# Altium footprint library uw-madison-parts.PcbLib: 40 footprints (part 1 of 3)
Each footprint in its own frame and in the unit in brackets; x right, y up, seen from the top. Pads: shape width x height; smd on the part's side, far side on the other; paste and mask are expansions set on the pad; w line width, h text height; cw(c..) or ccw(c..) is an arc to the next point about the centre after c.
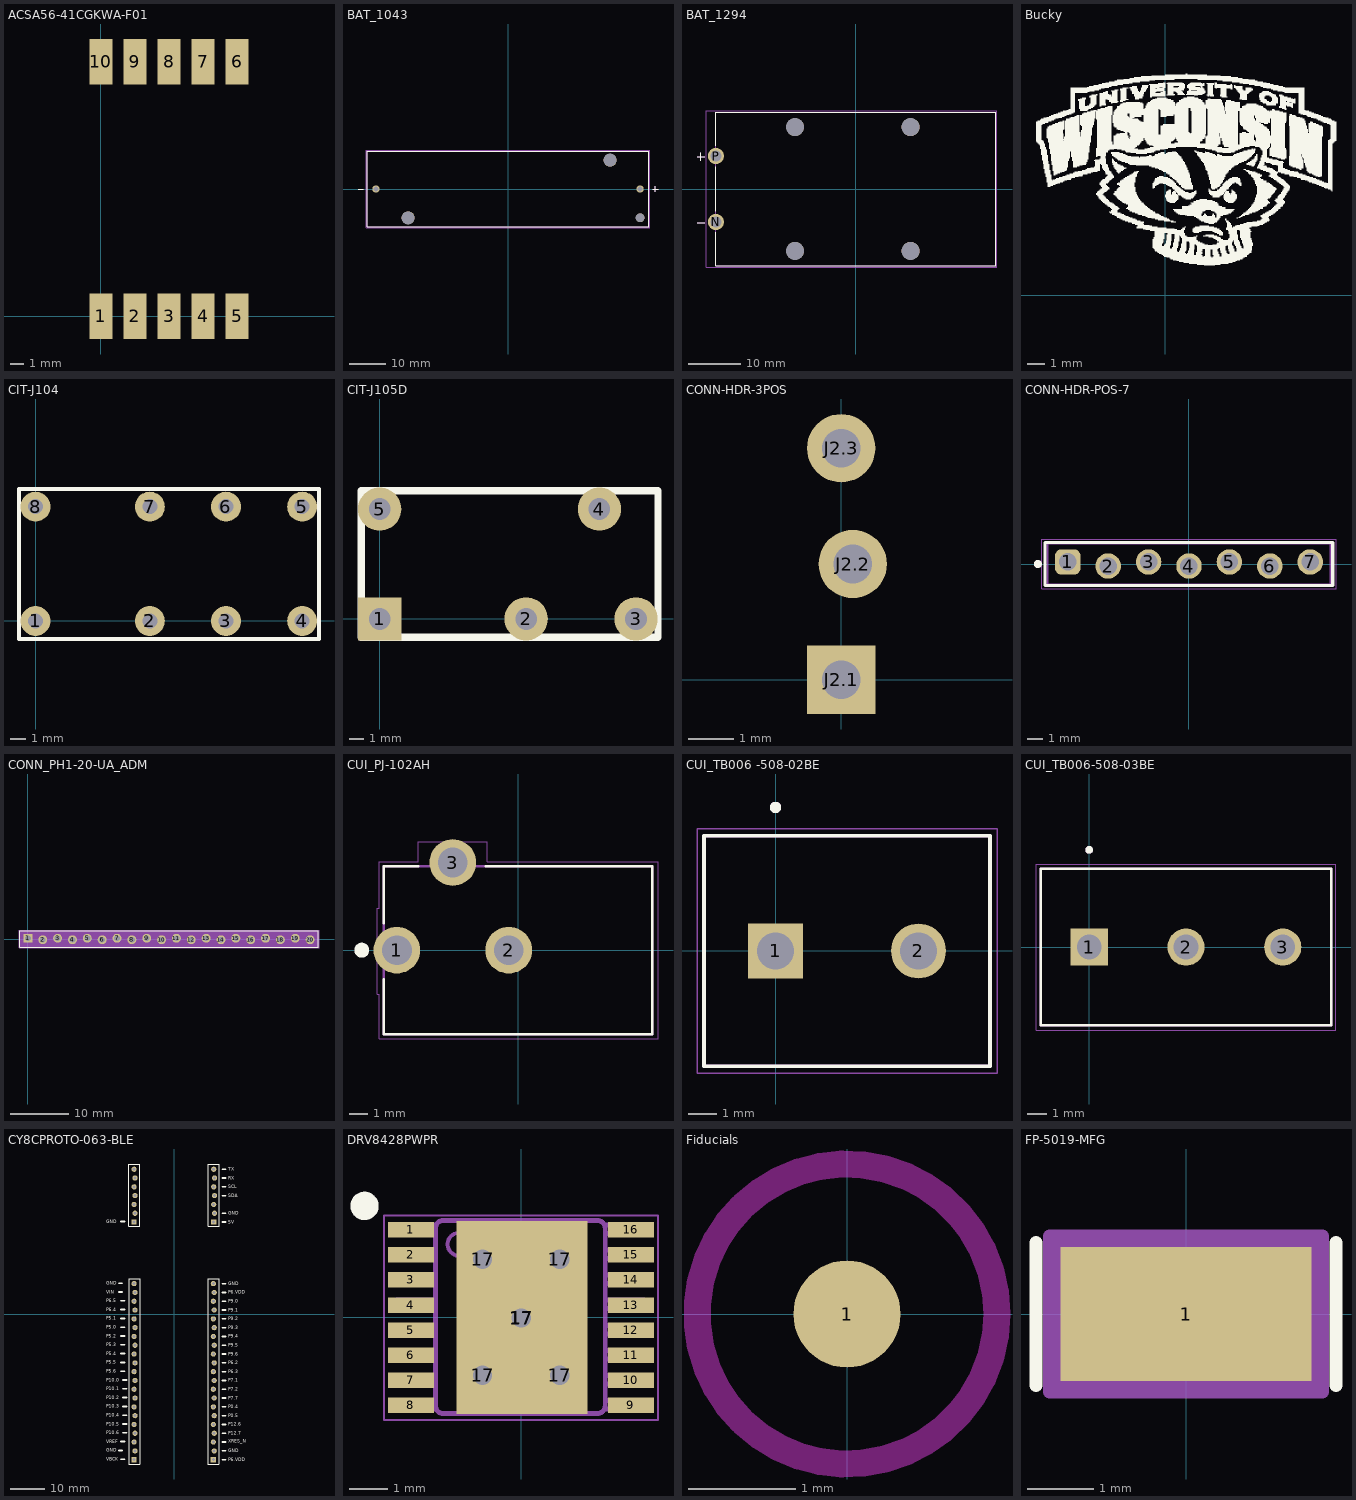
[diagram p0: the footprints below, top view; thin cyan lines are the x and y axes]

## ACSA56-41CGKWA-F01 [mm]
pads (10):
  rect 1.7x3.4 smd: 1(0,0) 2(2.54,0) 3(5.08,0) 4(7.62,0) 5(10.16,0) 6(10.16,19) 7(7.62,19) 8(5.08,19) 9(2.54,19) 10(0,19)
3D body "ACSA56-41CGKWA-F01.step": height 3.8, standoff 0, extent -1.12,0.025 11.28,19.025

## BAT_1043 [mm]
height 14.86
pads (5):
  round 1.98 hole 1.32: N(-36.11,0) P(36.11,0)
  round 3.55 hole 3.55 unplated: ""(-27.29,-7.87) ""(27.91,7.87)
  round 2.39 hole 2.39 unplated: ""(36.11,-7.87)
Top Overlay:
  lines w0.127: -41,0 -39.5,0 ; 39.5,0 41,0 ; 40.25,-0.75 40.25,0.75 ; -38.525,-10.325 38.525,-10.325 38.525,10.325 -38.525,10.325 -38.525,-10.325
Mechanical 13:
  lines w0.127: -41,0 -39.5,0 ; 39.5,0 41,0 ; 40.25,-0.75 40.25,0.75 ; -38.525,-10.325 38.525,-10.325 38.525,10.325 -38.525,10.325 -38.525,-10.325
Mechanical 15:
  lines w0.05: -38.775,-10.575 38.775,-10.575 38.775,10.575 -38.775,10.575 -38.775,-10.575
3D body "step_temp.STEP": height 14.86, standoff -3.56, extent -38.532,-10.325 38.532,10.325

## BAT_1294 [mm]
height 20.32
pads (6):
  round 3.126 hole 2.11: N(-26.925,-6.35) P(-26.925,6.35)
  round 3.45 hole 3.45 unplated: ""(-11.685,-11.915) ""(-11.685,11.915) ""(10.545,-11.915) ""(10.545,11.915)
Top Overlay:
  lines w0.127: -30.56,-6.52 -29.06,-6.52 ; -30.56,6.23 -29.06,6.23 ; -29.81,5.48 -29.81,6.98 ; -26.925,-8.35 -26.925,-14.785 26.925,-14.785 26.925,14.785 -26.925,14.785 -26.925,8.35 ; -26.925,-4.3 -26.925,4.3
Mechanical 13:
  lines w0.127: -30.56,-6.52 -29.06,-6.52 ; -30.56,6.23 -29.06,6.23 ; -29.81,5.48 -29.81,6.98 ; -26.925,-14.785 26.925,-14.785 26.925,14.785 -26.925,14.785 -26.925,-14.785
Mechanical 15:
  lines w0.05: -28.82,-15.035 -28.82,15.035 27.175,15.035 27.175,-15.035 -28.82,-15.035
3D body "step_temp.STEP": height 20.32, standoff -7.62, extent -27.229,-14.783 26.924,14.783

## Bucky [mm]
Top Overlay:
  drawing of 2083 lines, arcs and shapes, not listed

## CIT-J104 [mm]
pads (8):
  round 2 hole 1: 1(0,0) 2(7.62,0) 3(12.7,0) 4(17.78,0) 5(17.78,7.62) 6(12.7,7.62) 7(7.62,7.62) 8(0,7.62)
Top Overlay:
  lines w0.25: -1.1,-1.2 -1.1,8.8 18.9,8.8 18.9,-1.2 -1.1,-1.2

## CIT-J105D [mm]
pads (5):
  rect 3x3 hole 1.5: 1(0,0)
  round 3 hole 1.5: 2(10.16,0) 3(17.78,0) 4(15.24,7.62) 5(0,7.62)
Top Overlay:
  lines w0.5: -1.27,-1.27 -1.27,8.89
  lines w0.508: -1.27,-1.27 19.304,-1.27 19.304,8.89 -1.27,8.89

## CONN-HDR-3POS [mm] "CONN HEADER VERT 3POS 2.54MM"
pads (3):
  rect 1.5x1.5 hole 0.85: J2.1(0,0)
  round 1.5 hole 0.85: J2.2(0.254,2.54) J2.3(0,5.08)

## CONN-HDR-POS-7 [mm] "Pin Header, pitch 2.54 mm, THT, Vertical, single row, 7p"
height 8.54
pads (7):
  rrect50% 1.6x1.6 hole 1.1: 1(-7.62,0.127)
  round 1.6 hole 1.1: 2(-5.08,-0.127) 3(-2.54,0.127) 4(0,-0.127) 5(2.54,0.127) 6(5.08,-0.127) 7(7.62,0.127)
Top Overlay:
  circle w0.25: c-9.49,0 r0.125
  lines w0.2: -9.04,-1.345 9.04,-1.345 9.04,1.345 -9.04,1.345 -9.04,-1.345
Top Courtyard:
  lines w0.05: -9.24,-1.545 -9.24,1.545 9.24,1.545 9.24,-1.545 -9.24,-1.545
Top Designator:
Top Component Outline:
  lines w0.1: -8.89,-1.27 -8.89,1.27 8.89,1.27 8.89,-1.27 -8.89,-1.27
Top Component Center:
  lines w0.05: -0.5,0 0.5,0 ; 0,-0.5 0,0.5
3D body "61300711121.stp": height 8.57, standoff -2.97, extent -8.89,-1.27 8.89,1.27

## CONN_PH1-20-UA_ADM [mil]
pads (20):
  rect 60x60 hole 40 paste-99999 mask+0: 1(0,5)
  round 60 hole 40 paste-99999 mask+0: 2(100,-5) 3(200,5) 4(300,-5) 5(400,5) 6(500,-5) 7(600,5) 8(700,-5) 9(800,5) 10(900,-5) 11(1000,5) 12(1100,-5) 13(1200,5) 14(1300,-5) 15(1400,5) 16(1500,-5) 17(1600,5) 18(1700,-5) 19(1800,5) 20(1900,-5)
Top Overlay:
  lines w6: -55,-54 1955,-54 1955,54 -55,54 -55,-54
Mechanical 13:
  lines w1: -50,-49 1950,-49 1950,49 -50,49 -50,-49
Mechanical 15:
  region: 1960,59 -60,59 -60,-59 1960,-59
  lines w6: -60,-59 -60,59 1960,59 1960,-59 -60,-59

## CUI_PJ-102AH [mm]
pads (3):
  round 2.5 hole 1.6: 1(-6.5,0) 2(-0.5,0) 3(-3.5,4.7)
Top Overlay:
  circle w0.4: c-8.382,0 r0.2
  lines w0.127: -7.2,-1.55 -7.2,-4.5 7.2,-4.5 7.2,4.5 -1.75,4.5 ; -7.2,1.45 -7.2,4.5 -5.35,4.5
Mechanical 13:
  lines w0.127: -7.2,-4.5 7.2,-4.5 7.2,4.5 -7.2,4.5 -7.2,-4.5
Mechanical 15:
  lines w0.05: -7.55,-2.35 -7.55,2.25 -7.45,2.25 -7.45,4.75 -5.35,4.75 -5.35,5.8 -1.65,5.8 -1.65,4.75 7.5,4.75 7.5,-4.75 -7.45,-4.75 -7.45,-2.35 -7.55,-2.35

## CUI_TB006 -508-02BE [mm]
pads (2):
  rect 1.95x1.95 / inner round 1.95 / far side rect 1.95x1.95 hole 1.3: 1(0,0)
  round 1.95 hole 1.3: 2(5.08,0)
Top Overlay:
  circle w0.2: c0,5.1 r0.1
  lines w0.127: -2.54,-4.1 7.62,-4.1 7.62,4.1 -2.54,4.1 -2.54,-4.1
Mechanical 13:
  circle w0.2: c0,5.1 r0.1
  lines w0.127: -2.54,-4.1 7.62,-4.1 7.62,4.1 -2.54,4.1 -2.54,-4.1
Mechanical 15:
  lines w0.05: -2.79,-4.35 -2.79,4.35 7.87,4.35 7.87,-4.35 -2.79,-4.35

## CUI_TB006-508-03BE [mm]
pads (3):
  rect 1.95x1.95 / inner round 1.95 / far side rect 1.95x1.95 hole 1.3: 1(0,0)
  round 1.95 hole 1.3: 2(5.08,0) 3(10.16,0)
Top Overlay:
  circle w0.2: c0,5.1 r0.1
  lines w0.127: -2.54,-4.1 12.7,-4.1 12.7,4.1 -2.54,4.1 -2.54,-4.1
Mechanical 13:
  circle w0.2: c0,5.1 r0.1
  lines w0.127: -2.54,-4.1 12.7,-4.1 12.7,4.1 -2.54,4.1 -2.54,-4.1
Mechanical 15:
  lines w0.05: -2.79,-4.35 -2.79,4.35 12.95,4.35 12.95,-4.35 -2.79,-4.35
3D body "step_temp.STEP": height 10, standoff -3.8, extent -3.04,-4.1 12.7,4.1

## CY8CPROTO-063-BLE [mm]
pads (56):
  rect 1.5x1.5 hole 0.85: J1.1(11.253,-41.911) J2.1(-11.607,-41.911) J6.1(11.353,26.671) J7.1(-11.607,26.671)
  round 1.5 hole 0.85: J1.2(11.507,-39.371) J1.3(11.253,-36.831) J1.4(11.507,-34.291) J1.5(11.253,-31.751) J1.6(11.507,-29.211) J1.7(11.253,-26.671) J1.8(11.507,-24.131) J1.9(11.253,-21.591) J1.10(11.507,-19.051) J1.11(11.253,-16.511) J1.12(11.507,-13.971) J1.13(11.253,-11.431) J1.14(11.507,-8.891) J1.15(11.253,-6.351) J1.16(11.507,-3.811) J1.17(11.253,-1.271) J1.18(11.507,1.269) J1.19(11.253,3.809) J1.20(11.507,6.349) J1.21(11.253,8.889) J2.2(-11.353,-39.371) J2.3(-11.607,-36.831) J2.4(-11.353,-34.291) J2.5(-11.607,-31.751) J2.6(-11.353,-29.211) J2.7(-11.607,-26.671) J2.8(-11.353,-24.131) J2.9(-11.607,-21.591) J2.10(-11.353,-19.051) J2.11(-11.607,-16.511) J2.12(-11.353,-13.971) J2.13(-11.607,-11.431) J2.14(-11.353,-8.891) J2.15(-11.607,-6.351) J2.16(-11.353,-3.811) J2.17(-11.607,-1.271) J2.18(-11.353,1.269) J2.19(-11.607,3.809) J2.20(-11.353,6.349) J2.21(-11.607,8.889) J6.2(11.607,29.211) J6.3(11.353,31.751) J6.4(11.607,34.291) J6.5(11.353,36.831) J6.6(11.607,39.371) J6.7(11.353,41.911) J7.2(-11.353,29.211) J7.3(-11.607,31.751) J7.4(-11.353,34.291) J7.5(-11.607,36.831) J7.6(-11.353,39.371) J7.7(-11.607,41.911)
Top Overlay:
  lines w0.254: -13.23,-43.161 -13.23,10.339 -9.98,10.339 -9.98,-43.161 -13.23,-43.161 ; -13.23,25.421 -13.23,43.421 -9.98,43.421 -9.98,25.421 -13.23,25.421 ; 9.63,-43.161 12.88,-43.161 12.88,10.339 9.63,10.339 9.63,-43.161 ; 9.73,25.421 9.73,43.421 12.98,43.421 12.98,25.421 9.73,25.421
  lines w0.508: -16.052,-39.244 -15.052,-39.244 ; -16.052,6.476 -15.052,6.476 ; -16.052,9.016 -15.052,9.016 ; -15.417,-41.784 -14.417,-41.784 ; -15.417,-36.704 -14.417,-36.704 ; -15.417,-16.384 -14.417,-16.384 ; -15.417,-13.844 -14.417,-13.844 ; -15.417,-11.304 -14.417,-11.304 ; -15.417,-8.764 -14.417,-8.764 ; -15.417,-6.224 -14.417,-6.224 ; -15.417,-3.684 -14.417,-3.684 ; -15.417,-1.144 -14.417,-1.144 ; -15.417,1.396 -14.417,1.396 ; -15.417,3.936 -14.417,3.936 ; -15.417,26.796 -14.417,26.796 ; -14.782,-34.164 -13.782,-34.164 ; -14.782,-31.624 -13.782,-31.624 ; -14.782,-29.084 -13.782,-29.084 ; -14.782,-26.544 -13.782,-26.544 ; -14.782,-24.004 -13.782,-24.004 ; -14.782,-21.464 -13.782,-21.464 ; -14.782,-18.924 -13.782,-18.924 ; 13.793,-41.911 14.793,-41.911 ; 13.793,-39.371 14.793,-39.371 ; 13.793,-36.831 14.793,-36.831 ; 13.793,-34.291 14.793,-34.291 ; 13.793,-31.751 14.793,-31.751 ; 13.793,-29.211 14.793,-29.211 ; 13.793,-26.671 14.793,-26.671 ; 13.793,-24.131 14.793,-24.131 ; 13.793,-21.591 14.793,-21.591 ; 13.793,-19.051 14.793,-19.051 ; 13.793,-16.511 14.793,-16.511 ; 13.793,-13.971 14.793,-13.971 ; 13.793,-11.431 14.793,-11.431 ; 13.793,-8.891 14.793,-8.891 ; 13.793,-6.351 14.793,-6.351 ; 13.793,-3.811 14.793,-3.811 ; 13.793,-1.271 14.793,-1.271 ; 13.793,1.269 14.793,1.269 ; 13.793,3.809 14.793,3.809 ; 13.793,6.349 14.793,6.349 ; 13.793,8.889 14.793,8.889 ; 13.793,26.669 14.793,26.669 ; 13.793,29.209 14.793,29.209 ; 13.793,34.289 14.793,34.289 ; 13.793,36.829 14.793,36.829 ; 13.793,39.369 14.793,39.369 ; 13.793,41.909 14.793,41.909
  text "VBCK" at -19.662,-42.219 h1
  text "P6.VDD" at 15.577,-42.346 h1
  text "GND" at 15.577,-39.806 h1
  text "XRES_N" at 15.577,-37.099 h1
  text "P12.7" at 15.577,-34.726 h1
  text "P12.6" at 15.577,-32.186 h1
  text "P0.5" at 15.577,-29.646 h1
  text "P0.4" at 15.577,-27.106 h1
  text "P7.7" at 15.577,-24.566 h1
  text "P7.2" at 15.577,-22.026 h1
  text "P7.1" at 15.577,-19.486 h1
  text "P6.3" at 15.577,-16.946 h1
  text "P6.2" at 15.577,-14.406 h1
  text "P9.6" at 15.577,-11.866 h1
  text "P9.5" at 15.577,-9.326 h1
  text "P9.4" at 15.577,-6.786 h1
  text "P9.3" at 15.577,-4.246 h1
  text "P9.2" at 15.577,-1.706 h1
  text "P9.1" at 15.577,0.834 h1
  text "P9.0" at 15.577,3.374 h1
  text "P6.VDD" at 15.577,5.914 h1
  text "GND" at 15.577,8.454 h1
  text "5V" at 15.517,26.234 h1
  text "GND" at 15.517,28.774 h1
  text "SDA" at 15.517,33.854 h1
  text "SCL" at 15.517,36.394 h1
  text "RX" at 15.517,38.934 h1
  text "TX" at 15.517,41.474 h1
  text "GND" at -19.662,-39.679 h1
  text "VREF" at -19.662,-37.139 h1
  text "P10.6" at -19.662,-34.599 h1
  text "P10.5" at -19.662,-32.059 h1
  text "P10.4" at -19.662,-29.519 h1
  text "P10.3" at -19.662,-26.979 h1
  text "P10.2" at -19.662,-24.439 h1
  text "P10.1" at -19.662,-21.899 h1
  text "P10.0" at -19.662,-19.359 h1
  text "P5.6" at -19.662,-16.819 h1
  text "P5.5" at -19.662,-14.279 h1
  text "P5.4" at -19.662,-11.739 h1
  text "P5.3" at -19.662,-9.199 h1
  text "P5.2" at -19.662,-6.659 h1
  text "P5.0" at -19.662,-4.119 h1
  text "P5.1" at -19.662,-1.579 h1
  text "P6.4" at -19.662,0.961 h1
  text "P6.5" at -19.662,3.501 h1
  text "VIN" at -19.662,6.041 h1
  text "GND" at -19.662,8.581 h1
  text "GND" at -19.662,26.361 h1

## DRV8428PWPR [mm]
pads (22):
  rect 1.2x0.4 smd paste+0 mask+0.051: 1(-2.854,2.267) 2(-2.854,1.617) 3(-2.854,0.967) 4(-2.854,0.317) 5(-2.854,-0.333) 6(-2.854,-0.983) 7(-2.854,-1.633) 8(-2.854,-2.283) 9(2.846,-2.283) 10(2.846,-1.633) 11(2.846,-0.983) 12(2.846,-0.333) 13(2.846,0.317) 14(2.846,0.967) 15(2.846,1.617) 16(2.846,2.267)
  round 1 hole 0.5: 17(-1,-1.5) 17(-1,1.5) 17(0.004,-0.02) 17(1,-1.5) 17(1,1.5)
  rect 3.4x5 smd paste-2.487 mask-2.489: 17(0.021,-0.008)
Top Overlay:
  circle w0.4: c-4.059,2.886 r0.167
Top Paste:
  region: -1.653,-1.618 -1.654,-1.609 -1.654,1.592 -1.653,1.602 -1.65,1.611 -1.646,1.62 -1.639,1.627 -1.632,1.634 -1.623,1.638 -1.614,1.641 -1.604,1.642 1.597,1.642 1.606,1.641 1.615,1.638 1.624,1.634 1.632,1.627 1.638,1.62 1.642,1.611 1.645,1.602 1.646,1.592 1.646,-1.609 1.645,-1.618 1.642,-1.627 1.638,-1.636 1.632,-1.644 1.624,-1.65 1.615,-1.654 1.606,-1.657 1.597,-1.658 -1.604,-1.658 -1.614,-1.657 -1.623,-1.654 -1.632,-1.65 -1.639,-1.644 -1.646,-1.636 -1.65,-1.627
Top Solder:
  region: -1.653,-1.618 -1.654,-1.609 -1.654,1.592 -1.653,1.602 -1.65,1.611 -1.646,1.62 -1.639,1.627 -1.632,1.634 -1.623,1.638 -1.614,1.641 -1.604,1.642 1.597,1.642 1.606,1.641 1.615,1.638 1.624,1.634 1.632,1.627 1.638,1.62 1.642,1.611 1.645,1.602 1.646,1.592 1.646,-1.609 1.645,-1.618 1.642,-1.627 1.638,-1.636 1.632,-1.644 1.624,-1.65 1.615,-1.654 1.606,-1.657 1.597,-1.658 -1.604,-1.658 -1.614,-1.657 -1.623,-1.654 -1.632,-1.65 -1.639,-1.644 -1.646,-1.636 -1.65,-1.627
Mechanical 13:
  drawing of 201 lines, arcs and shapes, not listed
Mechanical 15:
  lines w0.05: -3.554,-2.658 3.546,-2.658 3.546,2.642 -3.554,2.642 -3.554,-2.658
  lines w0.1: -0.504,-0.008 0.496,-0.008 ; -0.004,-0.508 -0.004,0.492
3D body "PWP0016C.stp": height 1.13, standoff 0, extent -3.2,-2.5 3.2,2.5

## Fiducials [mm]
pads (1):
  round 1 smd: 1(0,0)
Top Solder:
  circle w0.5: c0,0 r1.4
  region: 0,-1.4 -0.138,-1.4 -0.408,-1.346 -0.663,-1.241 -0.892,-1.087 -1.087,-0.892 -1.241,-0.663 -1.346,-0.408 -1.4,-0.138 -1.4,0 -1.4,0.138 -1.346,0.408 -1.241,0.663 -1.087,0.892 -0.892,1.087 -0.663,1.241 -0.408,1.346 -0.138,1.4 0,1.4 0.138,1.4 0.408,1.346 0.663,1.241 0.892,1.087 1.087,0.892 1.241,0.663 1.346,0.408 1.4,0.138 1.4,0 1.4,-0.138 1.346,-0.408 1.241,-0.663 1.087,-0.892 0.892,-1.087 0.663,-1.241 0.408,-1.346 0.138,-1.4
  pour cut-out: 0,-1.4 -0.138,-1.4 -0.408,-1.346 -0.663,-1.241 -0.892,-1.087 -1.087,-0.892 -1.241,-0.663 -1.346,-0.408 -1.4,-0.138 -1.4,0 -1.4,0.138 -1.346,0.408 -1.241,0.663 -1.087,0.892 -0.892,1.087 -0.663,1.241 -0.408,1.346 -0.138,1.4 0,1.4 0.138,1.4 0.408,1.346 0.663,1.241 0.892,1.087 1.087,0.892 1.241,0.663 1.346,0.408 1.4,0.138 1.4,0 1.4,-0.138 1.346,-0.408 1.241,-0.663 1.087,-0.892 0.892,-1.087 0.663,-1.241 0.408,-1.346 0.138,-1.4
Keep-Out Layer:
  circle w0.254: c0,0 r1.4

## FP-5019-MFG [mm]
pads (1):
  rect 3.8x2.03 smd paste+0 mask+0: 1(0,0)
Top Overlay:
  lines w0.2: -2.275,-1.08 -2.275,1.08 ; 2.275,-1.08 2.275,1.08
Top 3D Body:
  lines w0.2: -1.97,-1.08 -1.97,1.08 1.97,1.08 1.97,-1.08 -1.97,-1.08
Top Courtyard:
  lines w0.2: -2.07,-1.18 -2.07,1.18 2.07,1.18 2.07,-1.18 -2.07,-1.18
Top Assembly:
  lines w0.2: -2.07,-1.18 -2.07,1.18 2.07,1.18 2.07,-1.18 -2.07,-1.18
  text ".Designator" at 0,0.188 h1
Top Component Center:
  lines w0.1: -0.5,0 0.5,0 ; 0,-0.5 0,0.5